# Altium schematic symbol library 22nF capacitor 0805.SchLib: 1 symbol
Pins are listed as number, name and electrical type; pins without a type are passive.

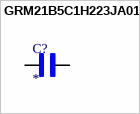
[diagram p0: symbol GRM21B5C1H223JA01L]

## GRM21B5C1H223JA01L
designator C?
0805 22 nF 50 V Â±5% Tolerance C0G SMT Multilayer Ceramic Capacitor; MF: Murata; MP: GRM21B5C1H223JA01L; SnapEDA_Link: https://www.snapeda.com/parts/GRM21B5C1H223JA01L/Murata/view-part/?ref=snap; Package: 805-2 Murata; Value: *; Check_prices: https://www.snapeda.com/parts/GRM21B5C1H223JA01L/Murata/view-part/?ref=eda
footprint CAPC2012X135N
pins: 1, 2